# Altium footprint library Footprints.PcbLib: 67 footprints (part 2 of 5)
Each footprint in its own frame and in the unit in brackets; x right, y up, seen from the top. Pads: shape width x height; smd on the part's side, far side on the other; paste and mask are expansions set on the pad; w line width, h text height; cw(c..) or ccw(c..) is an arc to the next point about the centre after c.
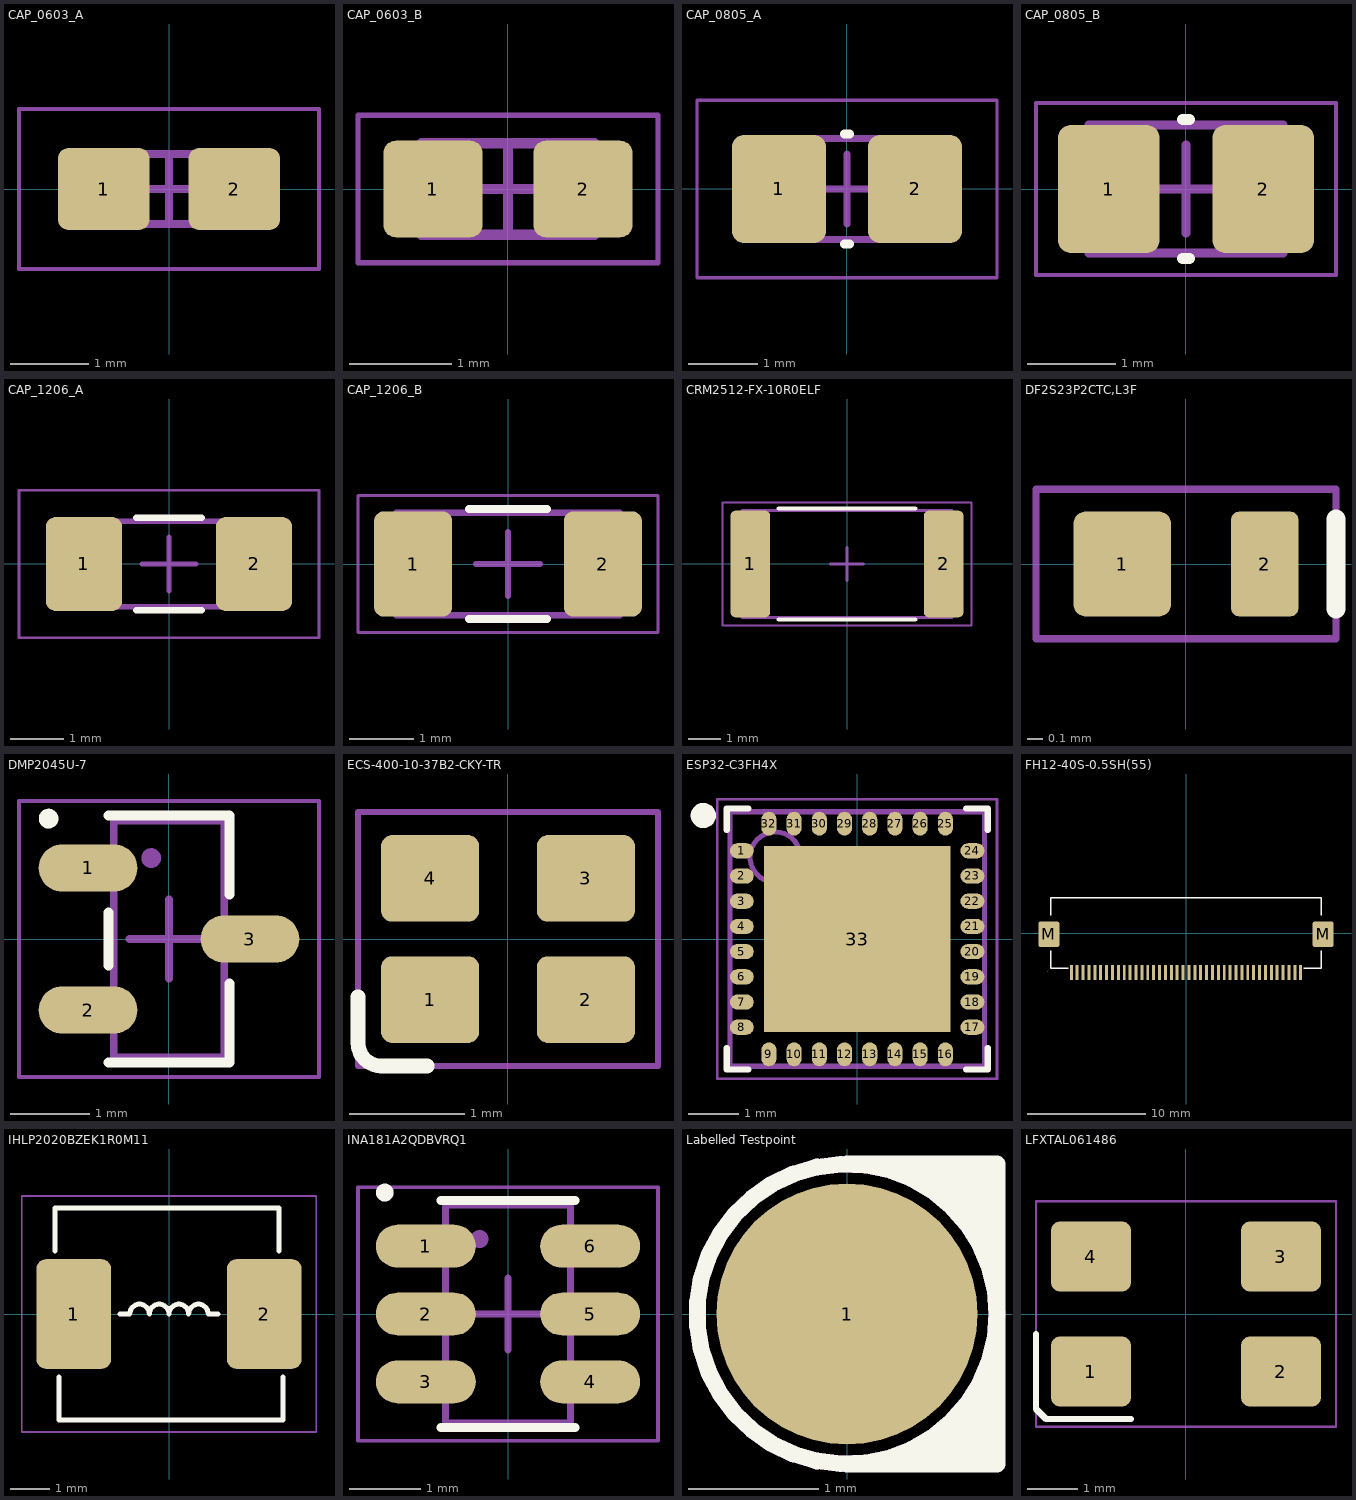
[diagram p1: the footprints below, top view; thin cyan lines are the x and y axes]

## CAP_0603_A [mm] "Chip Capacitor, 2-Leads, Body 1.60x0.80mm, IPC Low Density"
height 0.8
pads (2):
  rrect25% 1.175x1.05 smd: 1(-0.837,0) 2(0.838,0)
Top Courtyard:
  lines w0.05: -1.925,-1.025 1.925,-1.025 1.925,1.025 -1.925,1.025 -1.925,-1.025
Top Assembly:
  lines w0.1: -0.85,-0.45 0.85,-0.45 0.85,0.45 -0.85,0.45 -0.85,-0.45
Top Designator:
  text ".Designator" at -2.247,-0.225 h1
Top Component Center:
  lines w0.1: -0.45,0 0.45,0 ; 0,-0.45 0,0.45
3D body "CAP_0603_A.step": height 0.8, standoff 0, extent -0.8,-0.4 0.8,0.4

## CAP_0603_B [mm] "Chip Capacitor, 2-Leads, Body 1.60x0.80mm, IPC Medium Density"
height 0.8
pads (2):
  rrect25% 0.975x0.95 smd: 1(-0.737,0) 2(0.738,0)
Top Courtyard:
  lines w0.05: -1.475,-0.725 -1.475,0.725 1.475,0.725 1.475,-0.725 -1.475,-0.725
Top Assembly:
  lines w0.1: -0.85,-0.45 -0.85,0.45 0.85,0.45 0.85,-0.45 -0.85,-0.45
Top Designator:
  text ".Designator" at -2.247,-0.225 h1
Top Component Center:
  lines w0.1: -0.45,0 0.45,0 ; 0,-0.45 0,0.45
3D body "CAP_0603_B.step": height 0.8, standoff 0, extent -0.8,-0.4 0.8,0.4

## CAP_0805_A [mm] "Chip Capacitor, 2-Leads, Body 2.00x1.25mm, IPC Low Density"
height 0.85
pads (2):
  rrect25% 1.35x1.55 smd: 1(-0.975,0) 2(0.975,0)
Top Overlay:
  lines w0.127: -0.036,-0.788 0.036,-0.788 ; -0.036,0.788 0.036,0.788
Top Courtyard:
  lines w0.05: -2.15,-1.275 -2.15,1.275 2.15,1.275 2.15,-1.275 -2.15,-1.275
Top Assembly:
  lines w0.1: -1.1,-0.725 -1.1,0.725 1.1,0.725 1.1,-0.725 -1.1,-0.725
Top Designator:
  text ".Designator" at -2.247,-0.225 h1
Top Component Center:
  lines w0.1: -0.5,0 0.5,0 ; 0,-0.5 0,0.5
3D body "CAP_0805_A.step": height 0.85, standoff 0, extent -1,-0.625 1,0.625

## CAP_0805_B [mm] "Chip Capacitor, 2-Leads, Body 2.00x1.25mm, IPC Medium Density"
height 0.8
pads (2):
  rrect25% 1.15x1.45 smd: 1(-0.875,0) 2(0.875,0)
Top Overlay:
  lines w0.127: -0.036,-0.788 0.036,-0.788 ; -0.036,0.788 0.036,0.788
Top Courtyard:
  lines w0.05: -1.7,-0.975 -1.7,0.975 1.7,0.975 1.7,-0.975 -1.7,-0.975
Top Assembly:
  lines w0.1: -1.1,-0.725 -1.1,0.725 1.1,0.725 1.1,-0.725 -1.1,-0.725
Top Designator:
  text ".Designator" at -2.247,-0.225 h1
Top Component Center:
  lines w0.1: -0.5,0 0.5,0 ; 0,-0.5 0,0.5
3D body "CAP_0805_B.step": height 0.8, standoff 0, extent -1,-0.625 1,0.625

## CAP_1206_A [mm] "Chip Capacitor, 2-Leads, Body 3.20x1.50mm, IPC Low Density"
height 1.25
pads (2):
  rrect25% 1.425x1.75 smd: 1(-1.587,0) 2(1.587,0)
Top Overlay:
  lines w0.127: -0.611,-0.864 0.611,-0.864 ; -0.611,0.863 0.611,0.863
Top Courtyard:
  lines w0.05: -2.8,-1.375 2.8,-1.375 2.8,1.375 -2.8,1.375 -2.8,-1.375
Top Assembly:
  lines w0.1: -1.75,-0.8 1.75,-0.8 1.75,0.8 -1.75,0.8 -1.75,-0.8
Top Designator:
  text ".Designator" at -2.247,-0.225 h1
Top Component Center:
  lines w0.1: -0.5,0 0.5,0 ; 0,-0.5 0,0.5
3D body "CAP_1206_A.step": height 1.25, standoff 0, extent -1.6,-0.75 1.6,0.75

## CAP_1206_B [mm] "Chip Capacitor, 2-Leads, Body 3.20x1.50mm, IPC Medium Density"
height 1.25
pads (2):
  rrect25% 1.225x1.65 smd: 1(-1.488,0) 2(1.488,0)
Top Overlay:
  lines w0.127: -0.611,-0.864 0.611,-0.864 ; -0.611,0.863 0.611,0.863
Top Courtyard:
  lines w0.05: -2.35,-1.075 2.35,-1.075 2.35,1.075 -2.35,1.075 -2.35,-1.075
Top Assembly:
  lines w0.1: -1.75,-0.8 1.75,-0.8 1.75,0.8 -1.75,0.8 -1.75,-0.8
Top Designator:
  text ".Designator" at -2.247,-0.225 h1
Top Component Center:
  lines w0.1: -0.5,0 0.5,0 ; 0,-0.5 0,0.5
3D body "CAP_1206_B.step": height 1.25, standoff 0, extent -1.6,-0.75 1.6,0.75

## CRM2512-FX-10R0ELF [mm] "Chip Resistor, 2-Leads, Body 6.30x3.10mm, IPC Medium Density"
height 0.8
pads (2):
  rrect25% 1.225x3.3 smd: 1(-2.987,0) 2(2.987,0)
Top Overlay:
  lines w0.127: -2.111,-1.714 2.111,-1.714 ; -2.111,1.713 2.111,1.713
Top Courtyard:
  lines w0.05: -3.85,-1.9 -3.85,1.9 3.85,1.9 3.85,-1.9 -3.85,-1.9
Top Assembly:
  lines w0.1: -3.25,-1.65 -3.25,1.65 3.25,1.65 3.25,-1.65 -3.25,-1.65
Top Designator:
  text ".Designator" at -2.247,-0.225 h1
Top Component Center:
  lines w0.1: -0.5,0 0.5,0 ; 0,-0.5 0,0.5
3D body "CRM2512-FX-10R0ELF.step": height 0.8, standoff 0, extent -3.15,-1.55 3.15,1.55

## DF2S23P2CTC,L3F [mm]
height 0.48
pads (2):
  rrect25% 0.65x0.7 smd: 1(-0.425,0)
  rrect25% 0.45x0.7 smd: 2(0.525,0)
Top Overlay:
  lines w0.127: 1,-0.3 1,0.3
Top Courtyard:
  lines w0.05: -1,-0.5 1,-0.5 1,0.5 -1,0.5 -1,-0.5
Top Designator:
  text ".Designator" at -2.247,-0.225 h1
3D body "CST2C (1).step": height 0.48, standoff 0, extent -0.8,-0.4 0.8,0.4

## DMP2045U-7 [mm] "SOT23, 3-Leads, Body 2.90x2.40mm, Pitch 0.90mm, IPC Medium Density"
height 1.15
pads (3):
  oval 1.25x0.6 smd: 1(-1.025,0.9) 2(-1.025,-0.9) 3(1.025,0)
Top Overlay:
  circle w0.125: c-1.525,1.525 r0.062
  lines w0.127: -0.763,-1.563 0.764,-1.563 0.764,-0.564 ; -0.763,-0.336 -0.763,0.336 ; -0.763,1.563 0.764,1.563 0.764,0.564
Top Courtyard:
  lines w0.05: -1.9,-1.75 -1.9,1.75 1.9,1.75 1.9,-1.75 -1.9,-1.75
Top Assembly:
  circle w0.125: c-0.225,1.025 r0.062
  lines w0.1: -0.7,-1.5 -0.7,1.5 0.7,1.5 0.7,-1.5 -0.7,-1.5
Top Designator:
  text ".Designator" at -2.247,-0.225 h1
Top Component Center:
  lines w0.1: -0.5,0 0.5,0 ; 0,-0.5 0,0.5
3D body "DMP2045U-7.step": height 1.15, standoff 0, extent -1.275,-1.45 1.275,1.45

## ECS-400-10-37B2-CKY-TR [mm]
pads (4):
  rrect25% 0.85x0.75 smd: 1(-0.675,-0.525) 2(0.675,-0.525) 3(0.675,0.525) 4(-0.675,0.525)
Top Overlay:
  lines w0.127: -1.3,-0.5 -1.3,-0.9 ccw(c-1.1,-0.9) -1.1,-1.1 -0.7,-1.1
Top Courtyard:
  lines w0.05: -1.3,-1.1 1.3,-1.1 1.3,1.1 -1.3,1.1 -1.3,-1.1
Top Designator:
  text ".Designator" at -2.247,-0.225 h1
3D body "ECX-1637B2_ECS.step": height 0.51, standoff 0, extent -1.054,-0.851 1.054,0.851

## ESP32-C3FH4X [mm] "PQFN, 32-Leads, Body 5.00x5.00mm, Pitch 0.50mm, Thermal Pad 3.70x3.70mm, IPC Medium Density"
height 0.9
pads (33):
  oval 0.475x0.3 smd: 1(-2.288,1.75) 2(-2.288,1.25) 3(-2.288,0.75) 4(-2.288,0.25) 5(-2.288,-0.25) 6(-2.288,-0.75) 7(-2.288,-1.25) 8(-2.288,-1.75) 17(2.287,-1.75) 18(2.287,-1.25) 19(2.287,-0.75) 20(2.287,-0.25) 21(2.287,0.25) 22(2.287,0.75) 23(2.287,1.25) 24(2.287,1.75)
  oval 0.3x0.475 smd: 9(-1.75,-2.287) 10(-1.25,-2.287) 11(-0.75,-2.287) 12(-0.25,-2.287) 13(0.25,-2.287) 14(0.75,-2.287) 15(1.25,-2.287) 16(1.75,-2.287) 25(1.75,2.288) 26(1.25,2.288) 27(0.75,2.288) 28(0.25,2.288) 29(-0.25,2.288) 30(-0.75,2.288) 31(-1.25,2.288) 32(-1.75,2.288)
  rect 3.7x3.7 smd paste-1.85: 33(0,0)
Top Overlay:
  circle w0.25: c-3.052,2.45 r0.125
  lines w0.127: -2.589,-2.163 -2.589,-2.588 -2.164,-2.588 ; -2.589,2.164 -2.589,2.589 -2.164,2.589 ; 2.163,-2.588 2.588,-2.588 2.588,-2.163 ; 2.163,2.589 2.588,2.589 2.588,2.164
Top Paste:
  rectangle: 0.227,-1.397 1.397,-0.227
  rectangle: 0.227,0.227 1.397,1.397
  rectangle: -1.397,-1.397 -0.227,-0.227
  rectangle: -1.397,0.227 -0.227,1.397
Top Courtyard:
  lines w0.05: -2.775,-2.775 2.775,-2.775 2.775,2.775 -2.775,2.775 -2.775,-2.775
Top Assembly:
  circle w0.1: c-1.625,1.625 r0.5
  lines w0.1: -2.525,-2.525 2.525,-2.525 2.525,2.525 -2.525,2.525 -2.525,-2.525
Top Designator:
  text ".Designator" at -2.247,-0.225 h1
Top Component Center:
  lines w0.1: -0.5,0 0.5,0 ; 0,-0.5 0,0.5
3D body "ESP32-C3FH4X.step": height 0.9, standoff 0, extent -2.5,-2.5 2.5,2.5

## FH12-40S-0.5SH(55) [mm] "40 Position FFC, FPC Connector Contacts, Bottom 0.020\" (0.50mm) Surface Mount, Right Angle"
pads (42):
  rrect25% 0.25x1.3 smd: 1(-9.75,-3.35) 2(-9.25,-3.35) 3(-8.75,-3.35) 4(-8.25,-3.35) 5(-7.75,-3.35) 6(-7.25,-3.35) 7(-6.75,-3.35) 8(-6.25,-3.35) 9(-5.75,-3.35) 10(-5.25,-3.35) 11(-4.75,-3.35) 12(-4.25,-3.35) 13(-3.75,-3.35) 14(-3.25,-3.35) 15(-2.75,-3.35) 16(-2.25,-3.35) 17(-1.75,-3.35) 18(-1.25,-3.35) 19(-0.75,-3.35) 20(-0.25,-3.35) 21(0.25,-3.35) 22(0.75,-3.35) 23(1.25,-3.35) 24(1.75,-3.35) 25(2.25,-3.35) 26(2.75,-3.35) 27(3.25,-3.35) 28(3.75,-3.35) 29(4.25,-3.35) 30(4.75,-3.35) 31(5.25,-3.35) 32(5.75,-3.35) 33(6.25,-3.35) 34(6.75,-3.35) 35(7.25,-3.35) 36(7.75,-3.35) 37(8.25,-3.35) 38(8.75,-3.35) 39(9.25,-3.35) 40(9.75,-3.35)
  rrect25% 1.8x2.2 smd: M(-11.65,-0.1) M(11.65,-0.1)
Top Overlay:
  circle w0.127: c-11.75,-3.25 r0.01
  lines w0.127: -11.5,-1.5 -11.5,-3 -10,-3 ; -11.5,1.5 -11.5,3 11.5,3 11.5,1.5 ; 10,-3 11.5,-3 11.5,-1.5
Top Designator:
  text ".Designator" at -2.247,-0.225 h1
3D body "FH12-40S-0.5SH(55) (1).step": height 2.05, standoff -0.05, extent -12.05,-3.5 12.05,2.9

## IHLP2020BZEK1R0M11 [mm]
pads (2):
  rrect25% 1.905x2.79 smd: 1(-2.425,0) 2(2.425,0)
Top Overlay:
  lines w0.127: -2.9,1.6 -2.9,2.7 2.8,2.7 2.8,1.6 ; -2.8,-1.6 -2.8,-2.7 2.9,-2.7 2.9,-1.6 ; -1.25,0 -1,0 cw(c-0.75,0) -0.5,0 cw(c-0.25,0) 0,0 cw(c0.25,0) 0.5,0 cw(c0.75,0) 1,0 1.25,0
Top Courtyard:
  lines w0.05: -3.75,-3 3.75,-3 3.75,3 -3.75,3 -3.75,-3
Top Designator:
  text ".Designator" at -2.247,-0.225 h1
3D body "IHLP2020BZ.step": height 1.9, standoff -0.02, extent -2.751,-2.573 2.7,2.573

## INA181A2QDBVRQ1 [mm] "SOT23, 6-Leads, Body 2.90x2.80mm, Pitch 0.95mm, IPC Medium Density"
height 1.1
pads (6):
  oval 1.4x0.6 smd: 1(-1.15,0.95) 2(-1.15,0) 3(-1.15,-0.95) 4(1.15,-0.95) 5(1.15,0) 6(1.15,0.95)
Top Overlay:
  circle w0.125: c-1.725,1.7 r0.062
  lines w0.127: -0.938,-1.588 0.938,-1.588 ; -0.938,1.589 0.938,1.589
Top Courtyard:
  lines w0.05: -2.1,-1.775 -2.1,1.775 2.1,1.775 2.1,-1.775 -2.1,-1.775
Top Assembly:
  circle w0.125: c-0.4,1.05 r0.062
  lines w0.1: -0.875,-1.525 -0.875,1.525 0.875,1.525 0.875,-1.525 -0.875,-1.525
Top Designator:
  text ".Designator" at -2.247,-0.225 h1
Top Component Center:
  lines w0.1: -0.5,0 0.5,0 ; 0,-0.5 0,0.5
3D body "INA181A2QDBVRQ1.step": height 1.1, standoff 0, extent -1.5,-1.45 1.5,1.45

## Labelled Testpoint [mm] "2mm Diameter testpoint with silkscreen for labelling"
pads (1):
  round 2 smd paste-2539.97: 1(0,0)
Top Overlay:
  circle w0.127: c0,0 r1.15
  region: 0,1.15 1.15,1.15 1.15,0 1.144,0.113 1.1,0.334 1.014,0.542 0.889,0.73 0.73,0.889 0.542,1.014 0.334,1.1 0.113,1.144
  region: 0,-1.15 1.15,-1.15 1.15,0 1.144,-0.113 1.1,-0.334 1.014,-0.542 0.889,-0.73 0.73,-0.889 0.542,-1.014 0.334,-1.1 0.113,-1.144
  lines w0.127: 0,-1.15 1.15,-1.15 1.15,1.15 0,1.15
Top Courtyard:
  circle w0.127: c0,0 r1.15
Top Designator:
  text ".Designator" at -2.247,-0.225 h1

## LFXTAL061486 [mm] "8.192 MHz ±30ppm Crystal 10pF 150 Ohms 4-SMD, No Lead"
pads (4):
  rrect25% 1.6x1.4 smd: 1(-1.9,-1.15) 2(1.9,-1.15) 3(1.9,1.15) 4(-1.9,1.15)
Top Overlay:
  lines w0.127: -3,-0.4 -3,-1.7 -3,-1.9 -2.8,-2.1 -2.6,-2.1 -1.1,-2.1
Top Courtyard:
  lines w0.05: -3,-2.25 3,-2.25 3,2.25 -3,2.25 -3,-2.25
Top Designator:
  text ".Designator" at -2.247,-0.225 h1
3D body "CFPX-104.stp": height 1, standoff 0, extent -2.5,-1.6 2.5,1.6